# Altium integrated library MBRS1100T3.IntLib: 1 symbol
Pins are listed as number, name and electrical type; pins without a type are passive.

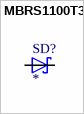
[diagram p0: symbol MBRS1100T3]

## MBRS1100T3
designator SD?
1.0 A, 100 V, Schottky Power Rectifier, Surface Mount; MPN: MBRS1100T3; MANUFACTURER: ON Semiconductor; Package: SMB-2 ON Semiconductor; DATASHEET_URL: https://www.onsemi.com/pub/Collateral/MBRS1100T3-D.PDF; Value: *; SOURCE_URL: https://www.snapeda.com/parts/MBRS1100T3/Onsemi/view-part/
footprint SMB
pins: A, C